# Altium schematic symbol library ProjectSymbols.SchLib: 12 symbols
Pins are listed as number, name and electrical type; pins without a type are passive.

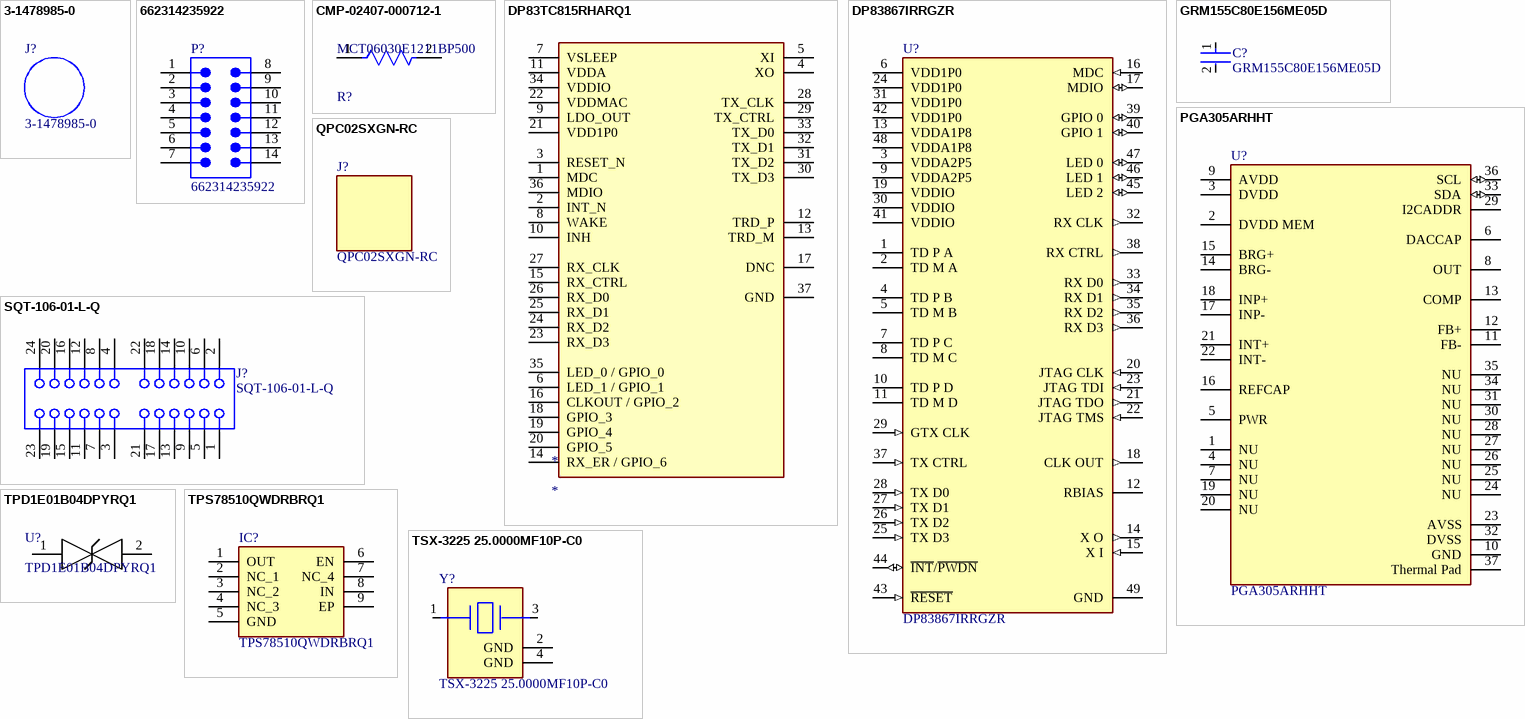
[diagram p0: symbols 3-1478985-0 to TSX-3225 25.0000MF10P-C0]

## 3-1478985-0
designator J?
CONN CAP COVER DUST FOR SMA JACK; Body Plating: Gold; Gender: Male; Polarized: No; Impedance: 50R; Body Material: Brass; Sealable: No (Without); ELV: Compliant; Packaging: Box; Length: 70mm; Radiation Hardening: No; Plating: Gold; RoHS Compliant: Yes; Series: SMA; Package Quantity: 100; Case/Package: SMA; Material: Brass
footprint FP-3-1478985-0-MFG

## 662314235922
designator P?
Conn, Header, 14Pos, 2Row, 3Mm Rohs Compliant: Yes; Insulation Resistance: 1GΩ; Gender: Male; Current Rating: 5A; Min Operating Temperature: -40°C; Length: 6.6mm; Max Operating Temperature: 105°C; Number of Pins: 14; Pitch: 3mm; Contact Plating: Tin; RoHS: Compliant
footprint 662314235922
pins: 1, 2, 3, 4, 5, 6, 7, 8, 9, 10, 11, 12, 13, 14

## CMP-02407-000712-1
designator R?, comment MCT06030E1211BP500
RES SMD 100 OHM 1% 1/8W 0603; Max Power Dissipation: 100mW; Temperature Coefficient: 15ppm/°C; Tolerance: 0.1%; Resistance: 1.21kR; Min Operating Temperature: -55°C; Composition: Thin Film; Length: 0.061inch; Depth: 0.85mm; Height: 0.022inch; Case/Package: 0603; Package Quantity: 5000; Number of Terminations: 2; Lead Free: Lead Free; Max Operating Temperature: 125°C; Packaging: Tape and Reel; Width: 0.033inch; Military Standard: Not
footprint FP-MCT0603-IPC_A
footprint FP-MCT0603-IPC_B
pins: 1, 2

## DP83TC815RHARQ1
designator *
Automotive 100Base-T1 Ethernet PHY with RGMII, SGMII and 802.1AS 36-VQFN -40 to 125; Manufacturer: Texas Instruments; Manufacturer Part Number: DP83TC815RHARQ1; Manufacturer Lifecycle Status: ACTIVE; Supplier: Mouser; Supplier Part Number: 595-DP83TC815RHARQ1; RoHS: Compliant; Category: Ethernet Controller; Stock: 627; Pricing: 1=3.97, 10=2.97, 50=2.72, 100=2.45, 1000=2.22, 10000=2.04 (USD); Case/Package: VQFN; Height: 1mm; Interface: RGMII, SGMII; Length: 6mm; Lifecycle Status: Production; Pins: 36; Thickness: 900µm; Width: 6mm; ComponentLink1URL: https://sigma.octopart.com:443/158979647/technical_drawing/Texas-Instruments-DP83TC815RHARQ1.pdf?src-supplier=Texas+Instruments; ComponentLink1Description: https://sigma.octopart.com:443/158979647/technical_drawing/Texas-Instruments-DP83TC815RHARQ1.pdf?src-supplier=Texas+Instruments; ComponentLink2URL: https://octopart.com:443/opatz8j6/c1?t=WeX0H2-6bUulIsG1Jt8hv3i0-DNF6EgtsYe5-0_d1TbLVM-qdl5AsRgmevogmcbsfVOmMxpULns-nvNEE9aIzANogtbU3GBMtZtI8fq6qckBovz9G97i9WrpuxlHuKs9BYn-6D1DANaFcY_qGIZJX9mEtaxsXjueSlrVl1iWUQxH2Bp2NDMtZlTzGpTWBiW7CpwP9V_eJlIy0vZBhrVCBBDA9JUIoAatkLwt8PzT_-9KrI00vijdvUEBTwRYjYCWzSz7DYr9IG1HssyswWTHqsAcyBRv6N7hVVMQZcnxqSqDhzf9RBMys264Gnq-bQZT3orF0xxyRFJYuY-UOMz_xm9QsZyD7JISTUueKHJNrPt3yQi5glmwWHqc71mltjYsTyFmv_ZjbIWrYzA&src-supplier=Texas+Instruments; ComponentLink2Description: https://octopart.com:443/opatz8j6/c1?t=WeX0H2-6bUulIsG1Jt8hv3i0-DNF6EgtsYe5-0_d1TbLVM-qdl5AsRgmevogmcbsfVOmMxpULns-nvNEE9aIzANogtbU3GBMtZtI8fq6qckBovz9G97i9WrpuxlHuKs9BYn-6D1DANaFcY_qGIZJX9mEtaxsXjueSlrVl1iWUQxH2Bp2NDMtZlTzGpTWBiW7CpwP9V_eJlIy0vZBhrVCBBDA9JUIoAatkLwt8PzT_-9KrI00vijdvUEBTwRYjYCWzSz7DYr9IG1HssyswWTHqsAcyBRv6N7hVVMQZcnxqSqDhzf9RBMys264Gnq-bQZT3orF0xxyRFJYuY-UOMz_xm9QsZyD7JISTUueKHJNrPt3yQi5glmwWHqc71mltjYsTyFmv_ZjbIWrYzA&src-supplier=Texas+Instruments; ComponentLink3URL: http://sigma.octopart.com:80/reach_statement/Texas-Instruments-company-64.pdf?src-supplier=Compliance+Statements; ComponentLink3Description: http://sigma.octopart.com:80/reach_statement/Texas-Instruments-company-64.pdf?src-supplier=Compliance+Statements; ComponentLink4URL: http://sigma.octopart.com:80/conflict_mineral_statement/Texas-Instruments-company-63.pdf?src-supplier=Compliance+Statements; ComponentLink4Description: http://sigma.octopart.com:80/conflict_mineral_statement/Texas-Instruments-company-63.pdf?src-supplier=Compliance+Statements
footprint FP-RHH0036C-MFG
footprint FP-RHH0036C-IPC_C
footprint FP-RHH0036C-IPC_B
footprint FP-RHH0036C-IPC_A
pins: 1 MDC, 2 INT_N, 3 RESET_N, 4 XO, 5 XI, 6 LED_1 / GPIO_1, 7 VSLEEP, 8 WAKE, 9 LDO_OUT, 10 INH, 11 VDDA, 12 TRD_P, 13 TRD_M, 14 RX_ER / GPIO_6, 15 RX_CTRL, 16 CLKOUT / GPIO_2, 17 DNC, 18 GPIO_3, 19 GPIO_4, 20 GPIO_5, 21 VDD1P0, 22 VDDMAC, 23 RX_D3, 24 RX_D2, 25 RX_D1, 26 RX_D0, 27 RX_CLK, 28 TX_CLK, 29 TX_CTRL, 30 TX_D3, 31 TX_D2, 32 TX_D1, 33 TX_D0, 34 VDDIO, 35 LED_0 / GPIO_0, 36 MDIO, 37 GND

## DP83867IRRGZR
designator U?
IC ETHERNET PHY 48VQFN; Manufacturer: Texas Instruments; Min Supply Voltage: 0.95V; Max Junction Temp: +105°C; Simplex Duplex: Full Duplex; Nominal Supply Current: 24-137mA; Standoff Height: 0mm; Data Rate: 1000Mbits/s; Max Supply Voltage: 3.45V; Octopart: https://octopart.com/dp83867irrgzr-texas+instruments-61842583; Digikey Description: IC ETHERNET PHY 48VQFN; Category: IC; Device Class L3: Ethernet Interface ICs; ComponentLink2Description: Datasheet; RoHS: TRUE; Temperature: -40°C to +85°C; Device Class L2: Interface ICs; Package: RGZ0048B; Temperature Range High: +85°C; ComponentLink2URL: http://www.ti.com/lit/ds/symlink/dp83867ir.pdf; Device Class L1: Integrated Circuits (ICs); Lead Free: Yes; Manufacturer Part Number: DP83867IRRGZR; Mouser Description: Ethernet ICs 10/100/1000 ENET PHY; Automotive: No; Temperature Range Low: -40°C; Height: 1mm; Interface: Ethernet
footprint FP-RGZ0048B-MFG
footprint FP-RGZ0048B-IPC_C
footprint FP-RGZ0048B-IPC_B
footprint FP-RGZ0048B-IPC_A
pins: 1 TD P A, 2 TD M A, 3 VDDA2P5 (power), 4 TD P B, 5 TD M B, 6 VDD1P0 (power), 7 TD P C, 8 TD M C, 9 VDDA2P5 (power), 10 TD P D, 11 TD M D, 12 RBIAS, 13 VDDA1P8 (power), 14 X O (out), 15 X I (in), 16 MDC (in), 17 MDIO (io), 18 CLK OUT (out), 19 VDDIO (power), 20 JTAG CLK (in), 21 JTAG TDO (out), 22 JTAG TMS (in), 23 JTAG TDI (in), 24 VDD1P0 (power), 25 TX D3 (in), 26 TX D2 (in), 27 TX D1 (in), 28 TX D0 (in), 29 GTX CLK (in), 30 VDDIO (power), 31 VDD1P0 (power), 32 RX CLK (out), 33 RX D0 (out), 34 RX D1 (out), 35 RX D2 (out), 36 RX D3 (out), 37 TX CTRL (in), 38 RX CTRL (out), 39 GPIO 0 (io), 40 GPIO 1 (io), 41 VDDIO (power), 42 VDD1P0 (power), 43 ~{RESET} (in), 44 ~{INT}/~{PWDN} (io), 45 LED 2 (io), 46 LED 1 (io), 47 LED 0 (io), 48 VDDA1P8 (power), 49 GND (power)

## GRM155C80E156ME05D
designator C?
Chip Multilayer Ceramic Capacitor for General Purpose 0402 15uF ±20% 2.5V X6S
footprint FP-GRM155-0_15-IPC_C
footprint FP-GRM155-0_15-IPC_A
footprint FP-GRM155-0_15-MFG
footprint FP-GRM155-0_15-IPC_B
pins: 1, 2

## PGA305ARHHT
designator U?
IC SIGNAL COND ANLG 36-VQFN; Operating Supply Current: 2.5mA; Output Type: I2C; Min Operating Temperature: -40°C; Max Operating Temperature: 150°C; Packaging: Cut Tape; Mount: Surface Mount; Case/Package: VQFN
footprint FP-RHH0036C-IPC_A
footprint FP-RHH0036C-IPC_C
footprint FP-RHH0036C-IPC_B
footprint FP-RHH0036C-MFG
pins: 1 NU, 2 DVDD MEM (power), 3 DVDD (power), 4 NU, 5 PWR, 6 DACCAP, 7 NU, 8 OUT, 9 AVDD (power), 10 GND (power), 11 FB-, 12 FB+, 13 COMP, 14 BRG-, 15 BRG+, 16 REFCAP, 17 INP-, 18 INP+, 19 NU, 20 NU, 21 INT+, 22 INT-, 23 AVSS (power), 24 NU, 25 NU, 26 NU, 27 NU, 28 NU, 29 I2CADDR (power), 30 NU, 31 NU, 32 DVSS (power), 33 SDA (io), 34 NU, 35 NU, 36 SCL (io), 37 Thermal Pad (power)

## QPC02SXGN-RC
designator J?
CONN JUMPER SHORTING .100" GOLD; Manufacturer: Sullins; Conn Orientation: Straight; Pitch: 2.54mm; Current Rating: 3A; Number Of Contacts: 2; Category: Conn; Temperature Range Low: -40°C; Temperature Range High: +85°C; Device Class L1: Connectors; Lead Free: Yes; Manufacturer Part Number: QPC02SXGN-RC; Automotive: No; Height: 6.17mm; ComponentLink2URL: https://s3.amazonaws.com/catalogspreads-pdf/PAGE128-129%20.100%20JUMPER.pdf; Device Class L2: unset; Footprint Url: https://drawings-pdf.s3.amazonaws.com/11510.pdf; Device Class L3: unset; Temperature: -40°C to +85°C; RoHS: TRUE; Digikey Description: CONN JUMPER SHORTING .100" GOLD; Octopart: https://octopart.com/qpc02sxgn-rc-sullins-19878795; Package: 0; ComponentLink2Description: Datasheet; Contact Material: Gold
footprint FP-QPC02SXGN-RC-MFG

## SQT-106-01-L-Q
designator J?
Cost-Effective Rugged Socket, Through-hole, Vertical, -55 to 125 degC, 2 mm Pitch, 24-Pin, Female, RoHS; Manufacturer: Samtec; Pitch: 2 mm; ComponentLink2URL: http://www.samtec.com/documents/webfiles/pdf/SQT_TH.PDF; RoHS: True; ComponentLink3Description: Package Specification; ComponentLink2Description: Datasheet; Temperature Range: -55 to 125 degC; ComponentLink1URL: http://www.samtec.com; ComponentLink1Description: Manufacturer URL; ComponentLink3URL: http://www.samtec.com/documents/webfiles/cpdf/SQT-1XX-XX-XXX-X-XXX-XXX-MKT.pdf; PackageReference: SQT-106-01-X-Q; PackageDescription: 2mm Socket Strip Assembly; PartNumber: SQT-106-01-L-Q; Orientation: Vertical; Mounting Technology: Through-hole; PackageVersion: BY, 7/1995; DatasheetVersion: F-214
footprint SMTC-SQT-106-01-X-Q (Socket Strip Assembly, 4x6 Pins, Vertical, 2mm Pitch, Female)
pins: 1, 2, 3, 4, 5, 6, 7, 8, 9, 10, 11, 12, 13, 14, 15, 16, 17, 18, 19, 20, 21, 22, 23, 24

## TPD1E01B04DPYRQ1
designator U?
Automotive 0.2pF Â±3.6V ESD protection diode in 0402 package for high-speed interfaces 2-X1SON -40 to 125; Manufacturer_Name: Texas Instruments; TYPE: TYPE; RefDes: RefDes; Copyright: Copyright (C) 2025 Ultra Librarian. All rights reserved.; Manufacturer_Part_Number: TPD1E01B04DPYRQ1
footprint DPY0002A-MFG
pins: 1, 2

## TPS78510QWDRBRQ1
designator IC?
Integrated Circuit; Manufacturer_Name: Texas Instruments; Datasheet Link: https://www.ti.com/lit/ds/symlink/tps785-q1.pdf?ts=1654240765019&ref_url=https%253A%252F%252Fcomponentsearchengine.com%252F; Height: 1mm; Manufacturer_Part_Number: TPS78510QWDRBRQ1; Mouser Part Number: 595-TPS78510QWDRBRQ1; Mouser Price/Stock: https://www.mouser.co.uk/ProductDetail/Texas-Instruments/TPS78510QWDRBRQ1?qs=iLbezkQI%252BsglWOoYBSvTYg%3D%3D; Arrow Part Number: TPS78510QWDRBRQ1; Arrow Price/Stock: https://www.arrow.com/en/products/tps78510qwdrbrq1/texas-instruments?region=nac
footprint TPS78510QWDRBRQ1
pins: 1 OUT, 2 NC_1, 3 NC_2, 4 NC_3, 5 GND, 6 EN, 7 NC_4, 8 IN, 9 EP

## TSX-3225 25.0000MF10P-C0
designator Y?
CRYSTAL 25.0000MHZ 18PF SMD; ESR (Equivalent Series Resistance): 40R; Frequency Stability: 10ppm; Frequency: 25MHz; Max Operating Temperature: 85°C; Length: 3.2mm; Packaging: Tape and Reel; Min Operating Temperature: -20°C; Depth: 2.5mm; Case/Package: SMD/SMT; Load Capacitance: 18pF; Number of Pins: 4
footprint FP-TSX-3225-MFG
pins: 1, 2 GND (power), 3, 4 GND (power)